# Altium footprint library NEXUS32.PcbLib: 39 footprints (part 2 of 3)
Each footprint in its own frame and in the unit in brackets; x right, y up, seen from the top. Pads: shape width x height; smd on the part's side, far side on the other; paste and mask are expansions set on the pad; w line width, h text height; cw(c..) or ccw(c..) is an arc to the next point about the centre after c.
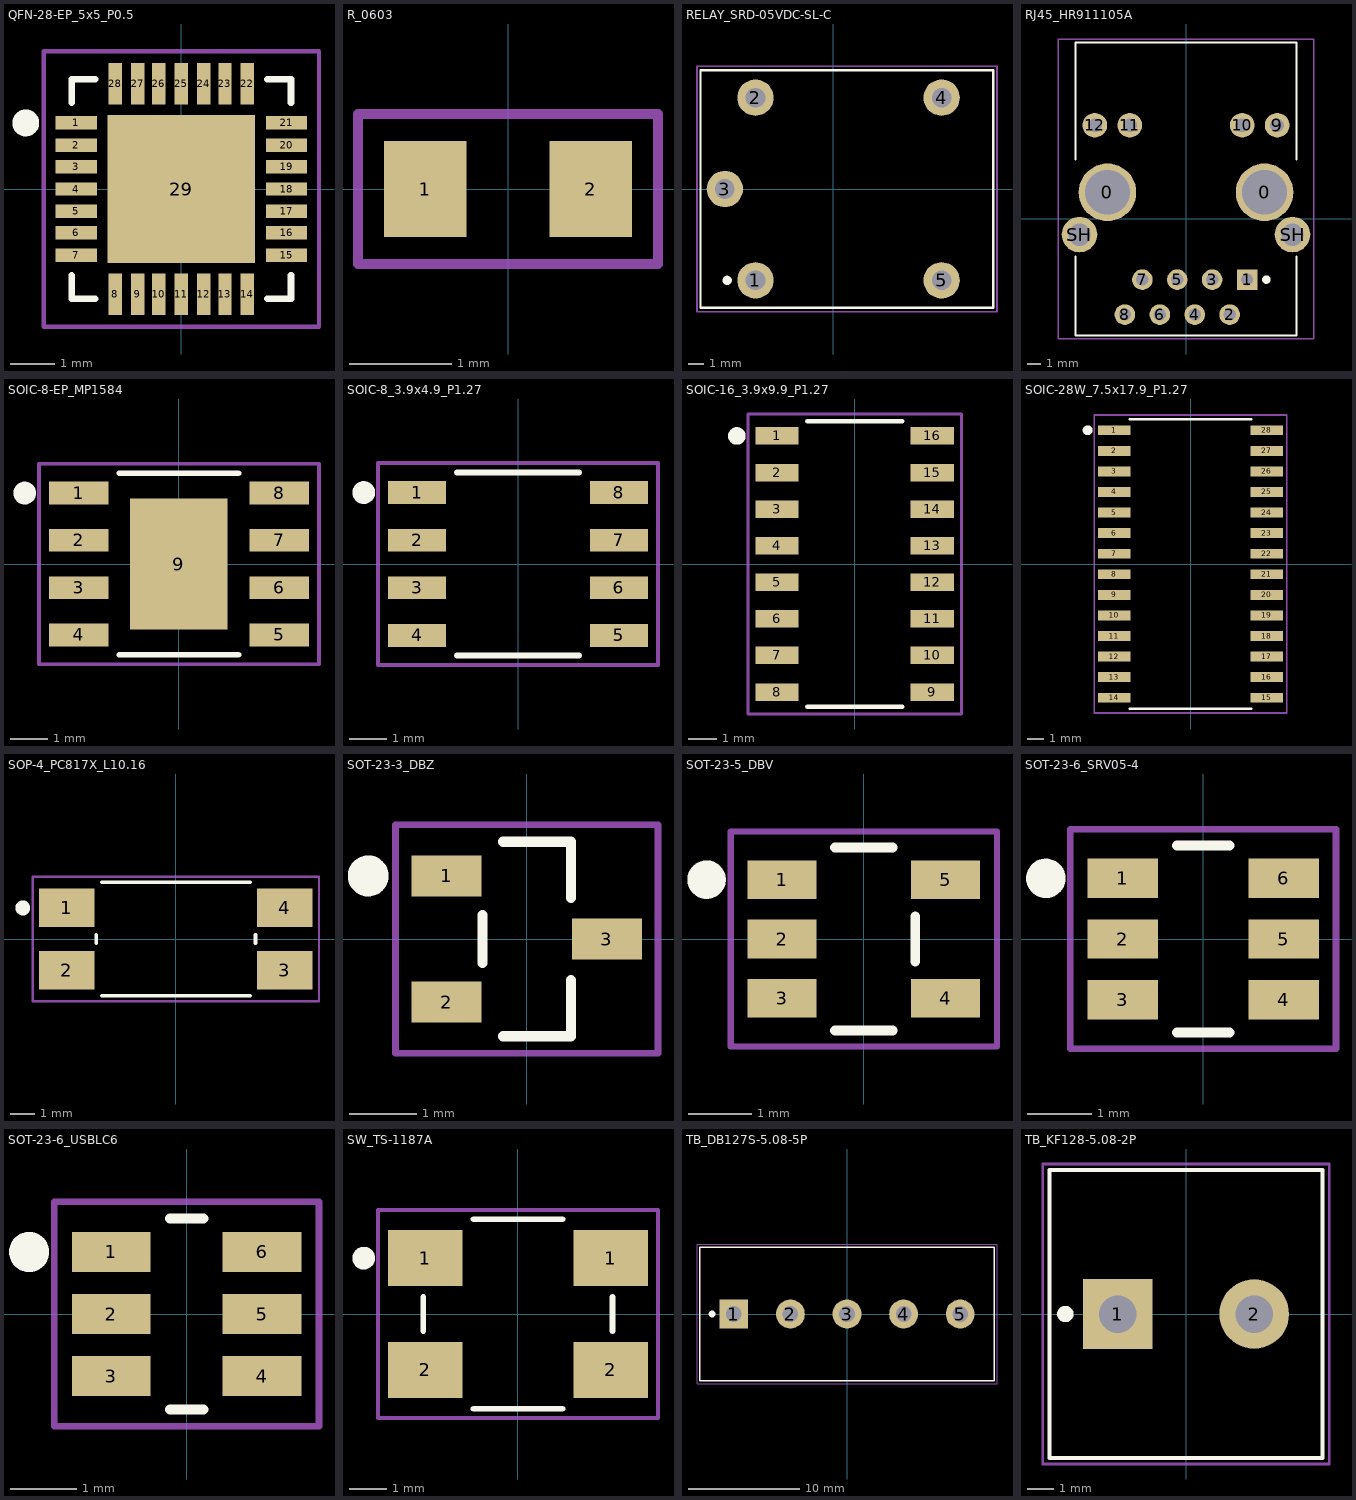
[diagram p1: the footprints below, top view; thin cyan lines are the x and y axes]

## QFN-28-EP_5x5_P0.5 [mil] "QFN-28 5x5 CP2102N"
height 36.61
pads (29):
  rect 37x12 smd: 1(-94,59) 2(-94,39) 3(-94,20) 4(-94,0) 5(-94,-20) 6(-94,-39) 7(-94,-59) 15(94,-59) 16(94,-39) 17(94,-20) 18(94,0) 19(94,20) 20(94,39) 21(94,59)
  rect 12x37 smd: 8(-59,-94) 9(-39,-94) 10(-20,-94) 11(0,-94) 12(20,-94) 13(39,-94) 14(59,-94) 22(59,94) 23(39,94) 24(20,94) 25(0,94) 26(-20,94) 27(-39,94) 28(-59,94)
  rect 132x132 smd: 29(0,0)
Top Overlay:
  circle w12: c-139,59 r6
  lines w6: -98,-77 -98,-98 -77,-98 ; -98,77 -98,98 -77,98 ; 77,-98 98,-98 98,-77 ; 77,98 98,98 98,77
Mechanical 1:
  lines w4: -123,-123 123,-123 123,123 -123,123 -123,-123
3D body "QFN-28-EP_5x5_P0.5.step": height 36.61, standoff 0, extent -98.82,-98.82 98.82,98.82

## R_0603 [mil] "Resistencia/condensador 0603 (1608 metrico)"
height 17.72
pads (2):
  rect 32x37 smd: 1(-32,0) 2(32,0)
Mechanical 1:
  lines w4: -58,-29 58,-29 58,29 -58,29 -58,-29
3D body "R_0603.step": height 17.72, standoff 0, extent -31.89,-15.94 31.89,15.94

## RELAY_SRD-05VDC-SL-C [mil] "Rele Songle SRD-05VDC-SL-C vista superior: 1-2 bobina, 3 COM, 4 NC, 5 NO (hole 1.3mm)"
height 606.3
pads (5):
  round 94 hole 51: 1(-201,-236) 2(-201,236) 3(-280,0) 4(280,236) 5(280,-236)
Top Overlay:
  circle w12: c-274,-236 r6
  lines w6: -343,-307 413,-307 413,307 -343,307 -343,-307
Mechanical 1:
  lines w4: -352,-317 423,-317 423,317 -352,317 -352,-317
3D body "RELAY_SRD-05VDC-SL-C.step": height 606.3, standoff -133.86, extent -337.6,-314.96 418.31,307.48

## RJ45_HR911105A [mil] "RJ45 HanRun HR911105A con magneticos y 2 LED (vista superior, frente del conector hacia abajo)"
height 544.88
pads (16):
  round 165 hole 127.95 unplated: 0(-225,76) 0(225,76)
  rect 59x59 hole 35: 1(175,-174)
  round 59 hole 35: 2(125,-274) 3(75,-174) 4(25,-274) 5(-25,-174) 6(-75,-274) 7(-125,-174) 8(-175,-274)
  round 71 hole 40: 9(261,268) 10(161,268) 11(-161,268) 12(-261,268)
  round 102 hole 64: SH(-305,-45) SH(305,-45)
Top Overlay:
  circle w12: c230,-174 r6
  lines w6: -316,-108 -316,-334 316,-334 316,-108 ; -316,170 -316,505 316,505 316,170
Mechanical 1:
  lines w4: -366,-344 -366,515 366,515 366,-344 -366,-344
3D body "RJ45_HR911105A.step": height 544.88, standoff -129.92, extent -312.36,-334.89 312.36,515.5

## SOIC-8-EP_MP1584 [mil] "SOIC-8E exposed pad MP1584EN"
height 66.93
pads (9):
  rect 63x24 smd: 1(-106,75) 2(-106,25) 3(-106,-25) 4(-106,-75) 5(106,-75) 6(106,-25) 7(106,25) 8(106,75)
  rect 103x138 smd: 9(0,0)
Top Overlay:
  circle w12: c-163,75 r6
  lines w6: -63,-96 63,-96 ; -63,96 63,96
Mechanical 1:
  lines w4: -148,-106 148,-106 148,106 -148,106 -148,-106
3D body "SOIC-8-EP_MP1584.step": height 66.93, standoff 0, extent -118.11,-96.46 118.11,96.46

## SOIC-8_3.9x4.9_P1.27 [mil] "SOIC-8 narrow MS-012 AT24C256C / DS1307Z"
height 66.93
pads (8):
  rect 61x24 smd: 1(-106,75) 2(-106,25) 3(-106,-25) 4(-106,-75) 5(106,-75) 6(106,-25) 7(106,25) 8(106,75)
Top Overlay:
  circle w12: c-162,75 r6
  lines w6: -64,-96 64,-96 ; -64,96 64,96
Mechanical 1:
  lines w4: -147,-106 147,-106 147,106 -147,106 -147,-106
3D body "SOIC-8_3.9x4.9_P1.27.step": height 66.93, standoff 0, extent -118.11,-96.46 118.11,96.46

## SOIC-16_3.9x9.9_P1.27 [mil] "SOIC-16 narrow MCP3208"
height 74.82
pads (16):
  rect 59x24 smd: 1(-106,175) 2(-106,125) 3(-106,75) 4(-106,25) 5(-106,-25) 6(-106,-75) 7(-106,-125) 8(-106,-175) 9(106,-175) 10(106,-125) 11(106,-75) 12(106,-25) 13(106,25) 14(106,75) 15(106,125) 16(106,175)
Top Overlay:
  circle w12: c-161,175 r6
  lines w6: -65,-195 65,-195 ; -65,195 65,195
Mechanical 1:
  lines w4: -146,-205 146,-205 146,205 -146,205 -146,-205
3D body "SOIC-16_3.9x9.9_P1.27.step": height 74.82, standoff 0, extent -118.23,-194.88 118.23,194.88

## SOIC-28W_7.5x17.9_P1.27 [mil] "SOIC-28 wide ENC28J60-I/SO"
height 112.22
pads (28):
  rect 79x24 smd: 1(-185,325) 2(-185,275) 3(-185,225) 4(-185,175) 5(-185,125) 6(-185,75) 7(-185,25) 8(-185,-25) 9(-185,-75) 10(-185,-125) 11(-185,-175) 12(-185,-225) 13(-185,-275) 14(-185,-325) 15(185,-325) 16(185,-275) 17(185,-225) 18(185,-175) 19(185,-125) 20(185,-75) 21(185,-25) 22(185,25) 23(185,75) 24(185,125) 25(185,175) 26(185,225) 27(185,275) 28(185,325)
Top Overlay:
  circle w12: c-250,325 r6
  lines w6: -148,-352 148,-352 ; -148,352 148,352
Mechanical 1:
  lines w4: -234,-362 234,-362 234,362 -234,362 -234,-362
3D body "SOIC-28W_7.5x17.9_P1.27.step": height 112.22, standoff 0, extent -204.84,-352.36 204.84,352.36

## SOP-4_PC817X_L10.16 [mil] "Fotoacoplador SMD-4 gullwing Sharp PC817X*CSP9F: 1 A, 2 K, 3 E, 4 C"
height 151.59
pads (4):
  rect 89x62 smd: 1(-175,50) 2(-175,-50) 3(175,-50) 4(175,50)
Top Overlay:
  circle w12: c-246,50 r6
  lines w6: -128,-7 -128,7 ; -119,-91 119,-91 ; -119,91 119,91 ; 128,-7 128,7
Mechanical 1:
  lines w4: -230,-100 230,-100 230,100 -230,100 -230,-100
3D body "SOP-4_PC817X_L10.16.step": height 151.59, standoff 0, extent -200.97,-90.55 200.97,90.55

## SOT-23-3_DBZ [mil] "SOT-23-3 REF3033 / BAT54S / AO3400A / S8050 - TI DBZ land pattern"
height 43.31
pads (3):
  rect 41x24 smd: 1(-47,37) 2(-47,-37) 3(47,0)
Top Overlay:
  circle w12: c-93,37 r6
  lines w6: -26,-14 -26,14 ; -14,-57 26,-57 26,-24 ; -14,57 26,57 26,24
Mechanical 1:
  lines w4: -77,-67 77,-67 77,67 -77,67 -77,-67
3D body "SOT-23-3_DBZ.step": height 43.31, standoff 0, extent -55.12,-57.09 55.12,57.09

## SOT-23-5_DBV [mil] "SOT-23-5 (DBV) TLV62569 / TLV75533 - TI DBV0005A"
height 49.22
pads (5):
  rect 43x24 smd: 1(-51,37) 2(-51,0) 3(-51,-37) 4(51,-37) 5(51,37)
Top Overlay:
  circle w12: c-98,37 r6
  lines w6: -18,-57 18,-57 ; -18,57 18,57 ; 32,-14 32,14
Mechanical 1:
  lines w4: -83,-67 -83,67 83,67 83,-67 -83,-67
3D body "SOT-23-5_DBV.step": height 49.22, standoff 0, extent -59.3,-57.09 59.3,57.09

## SOT-23-6_SRV05-4 [mil] "SOT-23-6 SRV05-4.TCT - patron Semtech"
height 64.96
pads (6):
  rect 43x24 smd: 1(-49,37) 2(-49,0) 3(-49,-37) 4(49,-37) 5(49,0) 6(49,37)
Top Overlay:
  circle w12: c-96,37 r6
  lines w6: -16,-57 16,-57 ; -16,57 16,57
Mechanical 1:
  lines w4: -81,-67 81,-67 81,67 -81,67 -81,-67
3D body "SOT-23-6_SRV05-4.step": height 64.96, standoff 0, extent -55.37,-57.09 55.37,57.09

## SOT-23-6_USBLC6 [mil] "SOT-23-6 USBLC6-2SC6 - patron ST"
height 64.96
pads (6):
  rect 47x24 smd: 1(-45,37) 2(-45,0) 3(-45,-37) 4(45,-37) 5(45,0) 6(45,37)
Top Overlay:
  circle w12: c-94,37 r6
  lines w6: -10,-57 10,-57 ; -10,57 10,57
Mechanical 1:
  lines w4: -79,-67 79,-67 79,67 -79,67 -79,-67
3D body "SOT-23-6_USBLC6.step": height 64.96, standoff 0, extent -55.37,-57.09 55.37,57.09

## SW_TS-1187A [mil] "Pulsador SMD 5.1x5.1 XKB TS-1187A; pads superiores = 1, inferiores = 2"
height 61.02
pads (4):
  rect 79x59 smd: 1(-98,59) 1(98,59) 2(-98,-59) 2(98,-59)
Top Overlay:
  circle w12: c-163,59 r6
  lines w6: -100,-18 -100,18 ; -47,-100 47,-100 ; -47,100 47,100 ; 100,-18 100,18
Mechanical 1:
  lines w4: -148,-110 148,-110 148,110 -148,110 -148,-110
3D body "SW_TS-1187A.step": height 61.02, standoff 0, extent -127.95,-102.38 127.95,102.38

## TB_DB127S-5.08-5P [mil] "Bornera tornillo 5 polos 5.08mm Dorabo DB127S (hole 1.4mm, pad 2.6mm)"
height 429.13
pads (5):
  rect 102x102 hole 55: 1(-400,0)
  round 102 hole 55: 2(-200,0) 3(0,0) 4(200,0) 5(400,0)
Top Overlay:
  circle w12: c-477,0 r6
  lines w6: -520,-236 520,-236 520,236 -520,236 -520,-236
Mechanical 1:
  lines w4: -530,-246 530,-246 530,246 -530,246 -530,-246
3D body "TB_DB127S-5.08-5P.step": height 429.13, standoff -137.8, extent -519.68,-236.22 519.72,236.22

## TB_KF128-5.08-2P [mil] "Bornera tornillo 2 polos 5.08mm KF128 (hole 1.4mm, pad 2.6mm)"
height 555.12
pads (2):
  rect 102x102 hole 55: 1(-100,0)
  round 102 hole 55: 2(100,0)
Top Overlay:
  circle w12: c-177,0 r6
  lines w6: -200,-211 200,-211 200,211 -200,211 -200,-211
Mechanical 1:
  lines w4: -210,-220 210,-220 210,220 -210,220 -210,-220
3D body "TB_KF128-5.08-2P.step": height 555.12, standoff -137.8, extent -223.62,-212.6 200,208.66